# Altium schematic symbol library UCP.SchLib: 378 symbols (part 2 of 14)
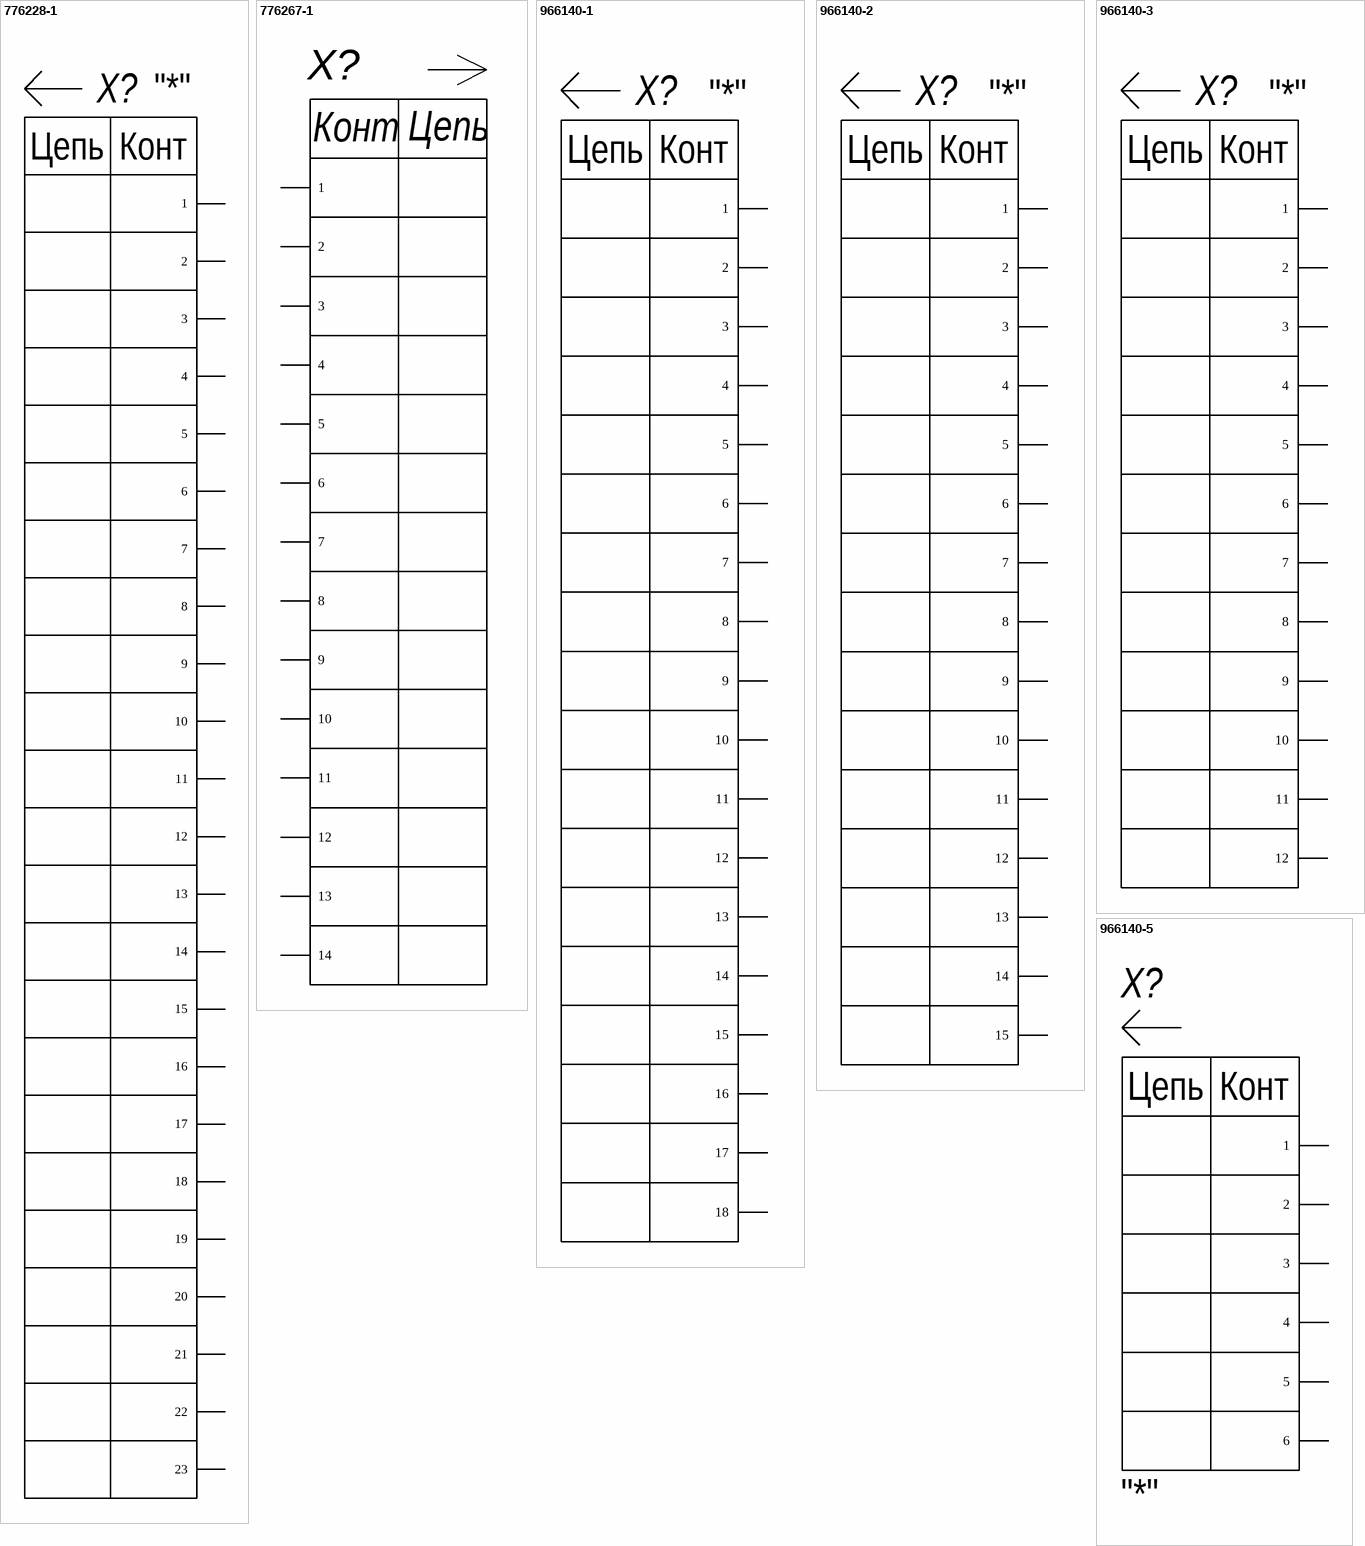
[diagram p25: symbols 776228-1 to 966140-5]

## 966140-3
designator X?  Marck-2: "*"  (hidden comment: 966140-3)
Connector Header Shrouded 12 Position 3.5mm Solder Right Angle Through Hole; Manufacturer 1: TE Connectivity; Manufacturer Part Number 1: 9-966140-3; Description 1: Conn Timer Connector HDR 12 POS 5mm Solder RA Thru-Hole 12 Terminal 1 Port Automotive Tray; Number of Terminals/Pins: 12; Circuit Application: Signal; Sealable: No (Without); Connector Type: Plug; Number of Ports: 1; PCB Mount Retention: Without; Shielding: Unshielded; Gender: Male; Primary Type: Rectangular; Tab Thickness: 0.8mm; Tab Width: 2.8mm; Row Spacing: 0.217inch; ComponentLink1URL: https://datasheet.ciiva.com/30081/eng-cat-1307998-1-0705-074-30081833.pdf?src-supplier=Onlinecomponents.com; ComponentLink1Description: https://datasheet.ciiva.com/30081/eng-cat-1307998-1-0705-074-30081833.pdf?src-supplier=Onlinecomponents.com; Marck-1: *; ComponentLink2URL: https://datasheet.ciiva.com/23803/1521067-23803407.pdf?src-supplier=Newark; ComponentLink2Description: https://datasheet.ciiva.com/23803/1521067-23803407.pdf?src-supplier=Newark; ComponentLink3URL: https://datasheet.ciiva.com/8003/1521067-8003965.pdf?src-supplier=Element14; ComponentLink3Description: https://datasheet.ciiva.com/8003/1521067-8003965.pdf?src-supplier=Element14; ComponentLink4URL: https://datasheet.ciiva.com/30152/291ddetrolleractionshowdocdocidcatalogsection7f1307998-2-gad-amp-30152293.pdf?src-supplier=Onlinecomponents.com; ComponentLink4Description: https://datasheet.ciiva.com/30152/291ddetrolleractionshowdocdocidcatalogsection7f1307998-2-gad-amp-30152293.pdf?src-supplier=Onlinecomponents.com; ComponentLink5URL: https://datasheet.ciiva.com/731/eng-cd-966140-f6-731254.pdf?src-supplier=Digi-Key; ComponentLink5Description: https://datasheet.ciiva.com/731/eng-cd-966140-f6-731254.pdf?src-supplier=Digi-Key; Supplier 1: Newark; Supplier Part Number 1: 16H9258; RoHS: Yes; Category: Headers and Wire Housings; Stock 1: 199; Pricing 1: 1=4,93000, 10=4,35000, 25=4,22000, 50=4,08000, 100=3,96000, 500=3,35000 (USD); Mount: THT; Contact Plating: Tin; Housing Material: Polyamide; Color: Black; Housing Color: Black; Contact Material: Bronze,Tin; Min Operating Temperature: -40°C; Max Operating Temperature: 212°C; Termination: Solder; Number of Contacts: 12; Number of Rows: 3; Packaging: Tray; Orientation: Right Angle; Package Quantity: 168; Number of Positions: 12; Series: Junior Power Timer; Number of Signal Positions: 12; PCB Mount Alignment: No (Without); Contact Type: Tab; Length: 1.4173inch; Width: 0.791inch; Pitch: 3.5mm; Radiation Hardening: No; ELV: Compliant; RoHS Compliant: Yes; Flammability Rating: UL94 HB; REACH SVHC: No SVHC; Lead Free: Lead Free; ComponentLink6URL: https://datasheet.ciiva.com/11759/0900766b80ee0736-11759911.pdf?src-supplier=RSComponents; ComponentLink6Description: https://datasheet.ciiva.com/11759/0900766b80ee0736-11759911.pdf?src-supplier=RSComponents; ComponentLink7URL: https://datasheet.ciiva.com/731/eng-cd-966140-f6-731255.pdf?src-supplier=Digi-Key; ComponentLink7Description: https://datasheet.ciiva.com/731/eng-cd-966140-f6-731255.pdf?src-supplier=Digi-Key; ComponentLink8URL: https://datasheet.ciiva.com/30179/291ddetrolleractionshowdocdocidcatalogsection7f1307998-2-gad-amp-30179467.pdf?src-supplier=Onlinecomponents.com; ComponentLink8Description: https://datasheet.ciiva.com/30179/291ddetrolleractionshowdocdocidcatalogsection7f1307998-2-gad-amp-30179467.pdf?src-supplier=Onlinecomponents.com; Supplier 2: RSComponents; Supplier Part Number 2: 7313117; Manufacturer 2: TE Connectivity; Manufacturer Part Number 2: 966140-3; Stock 2: 37; Pricing 2: 1=5,40600, 50=5,13500, 100=4,86500 (USD); ComponentLink9URL: https://datasheet.ciiva.com/11753/0900766b80f994f8-11753841.pdf?src-supplier=RSComponents; ComponentLink9Description: https://datasheet.ciiva.com/11753/0900766b80f994f8-11753841.pdf?src-supplier=RSComponents; ComponentLink10URL: https://datasheet.ciiva.com/30120/eng-cat-1307998-1-0705-074-30120973.pdf?src-supplier=Onlinecomponents.com; ComponentLink10Description: https://datasheet.ciiva.com/30120/eng-cat-1307998-1-0705-074-30120973.pdf?src-supplier=Onlinecomponents.com; Case/Package: DIP-12 (+MECH-2); Type: Вилка; Value: 966140-3
footprint TE_966140-3 (Conn Timer Connector HDR 12 POS 5mm Solder RA Thru-Hole 12 Terminal 1 Port Tray)
pins: 1, 2, 3, 4, 5, 6, 7, 8, 9, 10, 11, 12
text: Цепь; Конт

## 966140-5
designator X?  Marck-2: "*"  (hidden comment: 966140-5)
Conn Timer Connector HDR 6 POS 5mm Solder RA Thru-Hole 6 Terminal 1 Port Tray; Manufacturer 1: TE Connectivity AMP; Description 1: Conn Timer Connector HDR 6 POS 5mm Solder RA Thru-Hole 6 Terminal 1 Port Automotive Tray; Number of Terminals/Pins: 6; Number of Ports: 1; Circuit Application: Signal; PCB Mount Alignment: No (Without); PCB Mount Retention: Without; Shielding: Unshielded; Gender: Male; Primary Type: Rectangular; Pitch: 3.5mm; Tab Thickness: 0.8mm; Tab Width: 2.8mm; Value: 966140-4; ComponentLink1URL: https://datasheet.ciiva.com/30081/eng-cat-1307998-1-0705-074-30081833.pdf?src-supplier=Onlinecomponents.com; ComponentLink1Description: https://datasheet.ciiva.com/30081/eng-cat-1307998-1-0705-074-30081833.pdf?src-supplier=Onlinecomponents.com; Supplier 1: Newark; Supplier Part Number 1: 52R4345; Manufacturer Part Number 1: 966140-5; RoHS: Yes; Category: Connectors; Stock 1: 5; Pricing 1: 1=3,36000 (USD); Contact Material: Bronze; Contact Plating: Tin; Housing Material: Polyamide; Housing Color: Black; Color: Black; Min Operating Temperature: -40°C; Max Operating Temperature: 212°C; Number of Contacts: 6; Termination: Solder; Orientation: Right Angle; Number of Rows: 3; Package Quantity: 168; Packaging: Tray; Number of Positions: 6; Number of Signal Positions: 6; Sealable: No (Without); Series: Timer; Length: 1.0236inch; Width: 0.791inch; Lead Pitch: 5mm; Flammability Rating: UL94 HB; ELV: Compliant; RoHS Compliant: Yes; REACH SVHC: No SVHC; Lead Free: Lead Free; ComponentLink2URL: https://datasheet.ciiva.com/11759/0900766b80fa585c-11759987.pdf?src-supplier=RSComponents; ComponentLink2Description: https://datasheet.ciiva.com/11759/0900766b80fa585c-11759987.pdf?src-supplier=RSComponents; ComponentLink3URL: https://datasheet.ciiva.com/1439/1581332-1439076.pdf?src-supplier=Element14; ComponentLink3Description: https://datasheet.ciiva.com/1439/1581332-1439076.pdf?src-supplier=Element14; Marck-1: *; Case/Package: DIP-6 (+MECH-2); Mount: THT; Type: Вилка
footprint TE_966140-5 (Conn Timer Connector HDR 6 POS 5mm Solder RA Thru-Hole 6 Terminal 1 Port Tray)
pins: 1, 2, 3, 4, 5, 6
text: Цепь; Конт

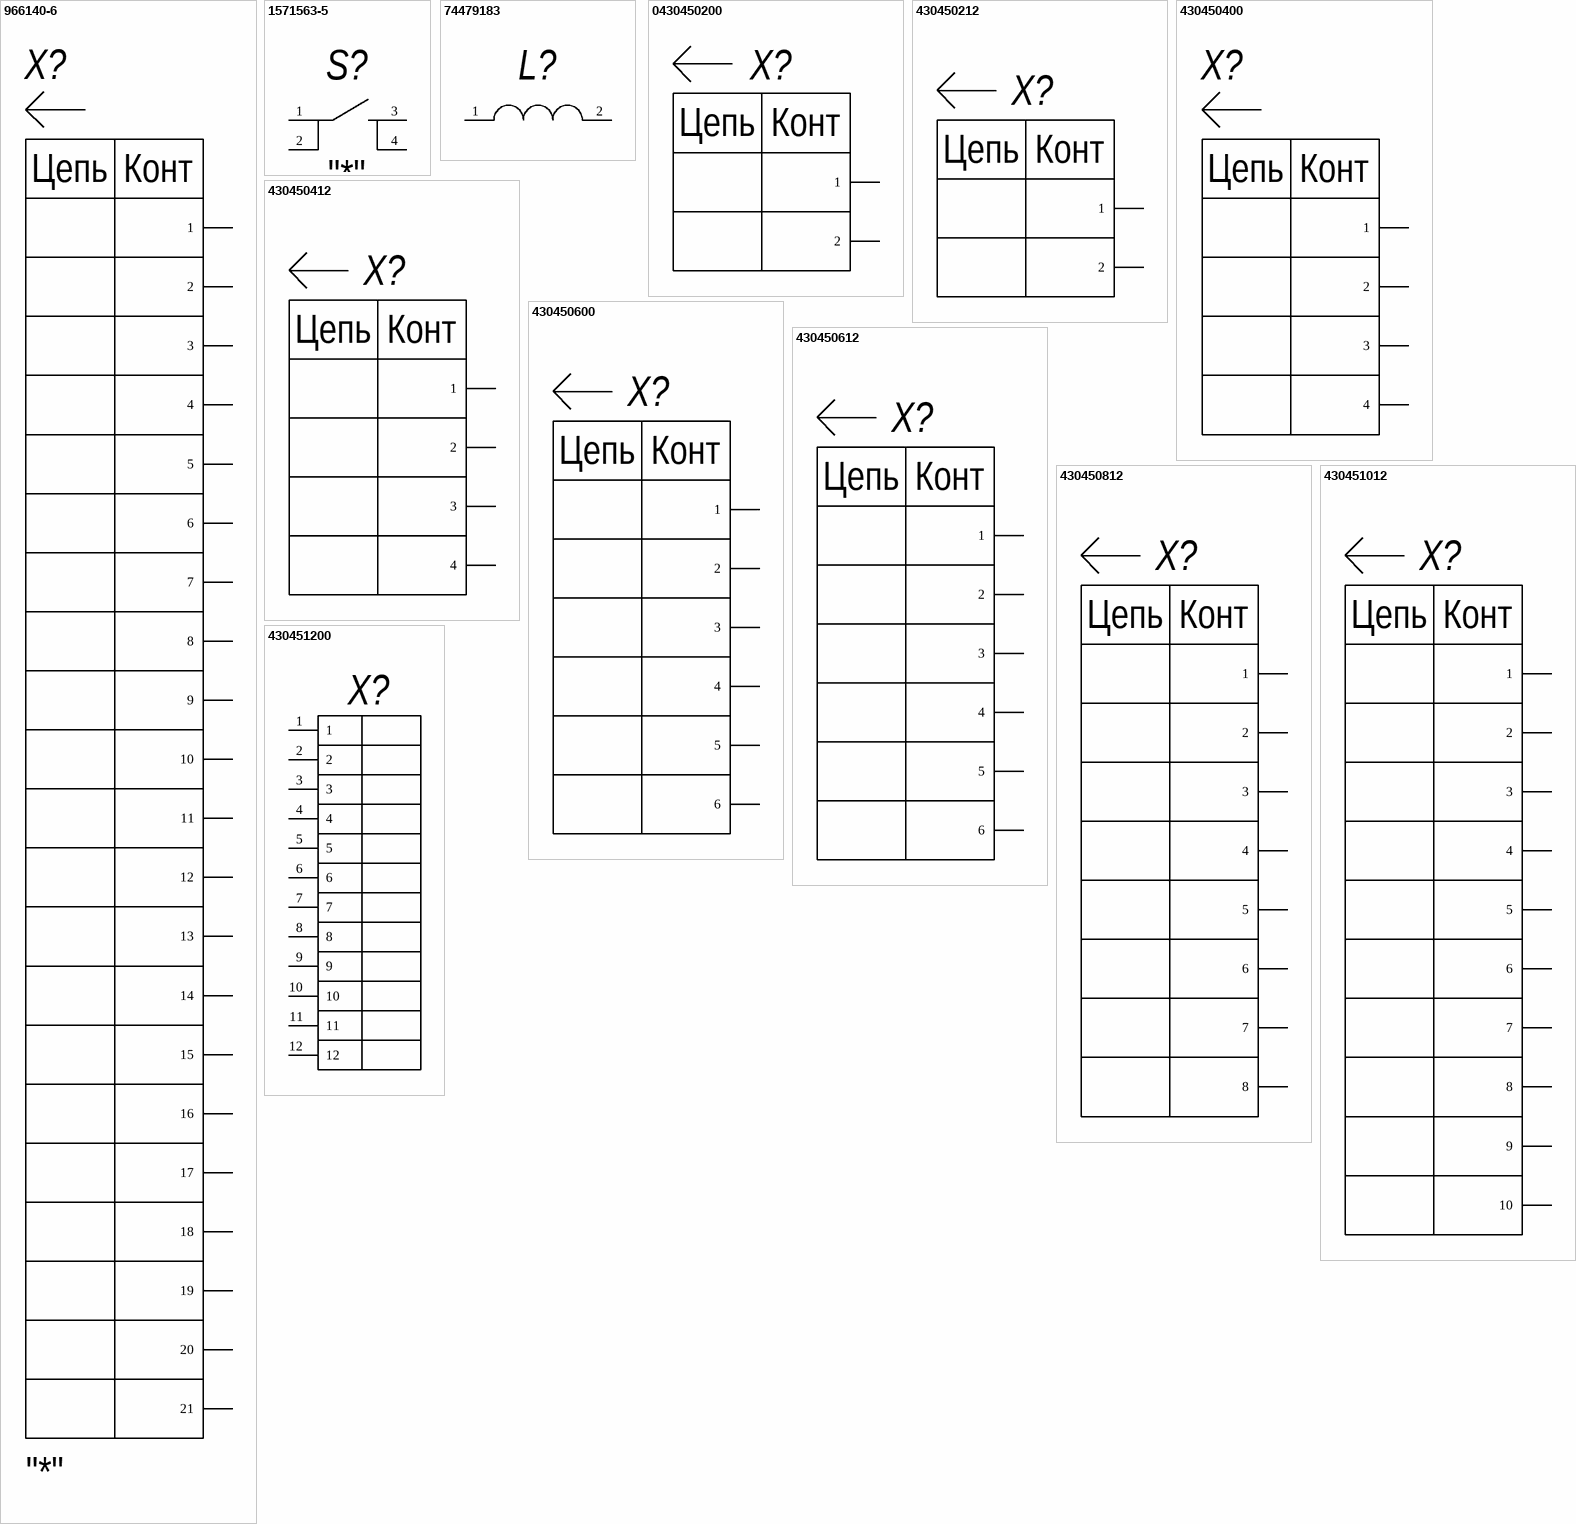
[diagram p3: symbols 966140-6 to 430451200]

## 966140-6
designator X?  Marck-2: "*"  (hidden comment: 966140-6)
Conn Timer Connector HDR 21 POS 5mm Solder RA Thru-Hole 21 Terminal 1 Port Tray; Manufacturer 1: TE Connectivity AMP; Manufacturer Part Number 1: 9-966140-6; Description 1: Conn Timer Connector HDR 21 POS 5mm Solder RA Thru-Hole 21 Terminal 1 Port Automotive Tray; Number of Terminals/Pins: 21; Circuit Application: Signal; Sealable: No (Without); PCB Mount Retention: Without; Shielding: Unshielded; Number of Ports: 1; Connector Type: Plug; Gender: Male; Pitch: 3.5mm; Tab Thickness: 0.8mm; Tab Width: 2.8mm; Value: 966140-5; Marck-1: *; Supplier 1: RSComponents; Supplier Part Number 1: 1839042; RoHS: Yes; Category: Headers and Wire Housings; Stock 1: 1; Pricing 1: 140=11,19100, 140=8,05600 (USD); Mount: THT; Contact Plating: Tin; Color: Black; Housing Color: Black; Housing Material: Polyamide; Contact Material: Bronze,Tin; Min Operating Temperature: -40°C; Max Operating Temperature: 212°C; Termination: Solder; Number of Rows: 3; Number of Contacts: 21; Package Quantity: 112; Number of Positions: 21; Packaging: Tray; Orientation: Right Angle; Number of Signal Positions: 21; PCB Mount Alignment: No (Without); Series: Messerleiste; Length: 51mm; Width: 0.791inch; Radiation Hardening: No; Flammability Rating: UL94 HB; ELV: Compliant; RoHS Compliant: Yes; REACH SVHC: No SVHC; Lead Free: Lead Free; ComponentLink1URL: https://datasheet.ciiva.com/23803/1605588-23803408.pdf?src-supplier=Newark; ComponentLink1Description: https://datasheet.ciiva.com/23803/1605588-23803408.pdf?src-supplier=Newark; ComponentLink2URL: https://datasheet.ciiva.com/30079/eng-cat-1307998-1-0705-074-30079007.pdf?src-supplier=Onlinecomponents.com; ComponentLink2Description: https://datasheet.ciiva.com/30079/eng-cat-1307998-1-0705-074-30079007.pdf?src-supplier=Onlinecomponents.com; ComponentLink3URL: https://datasheet.ciiva.com/29265/001005507-da-01-ml-21pol-messerleiste-90grad-de-en-29265446.pdf?src-supplier=Conrad; ComponentLink3Description: https://datasheet.ciiva.com/29265/001005507-da-01-ml-21pol-messerleiste-90grad-de-en-29265446.pdf?src-supplier=Conrad; Case/Package: DIP-21 (+MECH-2); Type: Вилка
footprint TE_966140-6 (Conn Timer Connector HDR 21 POS 5mm Solder RA Thru-Hole 21 Terminal 1 Port Tray)
pins: 1, 2, 3, 4, 5, 6, 7, 8, 9, 10, 11, 12, 13, 14, 15, 16, 17, 18, 19, 20, 21
text: Цепь; Конт

## 1571563-5
designator S?  Marck-2: "*"  (hidden comment: 1571563-5)
Alcoswitch Tactile FSM JSM, Tactile Switches, Round Actuator Style, Operating Function Yes, Copper Alloy, Silver, Low Profile 12.5 mm; Supplier 1: Newark; Supplier Part Number 1: 75AC5329; Marck-1: *; Case/Package: SMD-4; Mount: SMT; Type: Переключатель кнопочный; Value: 1571563-5
footprint 1571563-5 (Tactile Switches)
pins: 1 "Назначение вывода", 2 "Назначение вывода", 3 "Назначение вывода", 4 "Назначение вывода"

## 74479183
designator L?  (value not drawn)
WE-MI SMT Multilayer Inductor 22 uH 5 mA; Type: Бусина ферритовая; Value: FB1206; Case/Package: 1206; Mount: SMT
footprint INDC320X160X130L50
pins: 1 "Назначение вывода", 2 "Назначение вывода"

## 0430450200
designator X?  (value not drawn)
2 контакта; Supplier 1: Digi-Key; Supplier 2: Digi-Key; Supplier Part Number 1: WM1813-ND; Supplier Part Number 2: WM1813-ND; Case/Package: DIP-2 (+MECH-2); Mount: THT; Type: Вилка; Value: 430450200
footprint RHDRRA2W64P300_1X2_715X991H877 (Header, Right Angle Receptacle, 3.00 mm pitch; 0.64 mm lead width, 2 pins, 2 rows, 1 pins per row, 7.15mm L X 9.91 mm W X 8.77 mm H body)
pins: 1, 2
text: Цепь; Конт

## 430450212
designator X?  (value not drawn)
Conn.; Interconnect System; Header; Vertical; 2; Micro-Fit 3.0; Thru-Hole; Tin; Manufacturer 1: Molex; Manufacturer Part Number 1: 43045-0212; ComponentLink1URL: https://datasheet.ciiva.com/19462/883667-19462123.pdf?src-supplier=Jameco; ComponentLink1Description: https://datasheet.ciiva.com/19462/883667-19462123.pdf?src-supplier=Jameco; ComponentLink2URL: https://datasheet.ciiva.com/11748/0900766b800bd7d2-11748376.pdf?src-supplier=RSComponents; ComponentLink2Description: https://datasheet.ciiva.com/11748/0900766b800bd7d2-11748376.pdf?src-supplier=RSComponents; ComponentLink3URL: https://datasheet.ciiva.com/5159/0430451012-pcb-headers-142935-5159135.pdf?src-supplier=Mouser; ComponentLink3Description: https://datasheet.ciiva.com/5159/0430451012-pcb-headers-142935-5159135.pdf?src-supplier=Mouser; ComponentLink4URL: https://datasheet.ciiva.com/30056/13510430451012-pcb-headers-30056636.pdf?src-supplier=Onlinecomponents.com; ComponentLink4Description: https://datasheet.ciiva.com/30056/13510430451012-pcb-headers-30056636.pdf?src-supplier=Onlinecomponents.com; ComponentLink5URL: https://datasheet.ciiva.com/7810/19403-7810268.pdf?src-supplier=Element14; ComponentLink5Description: https://datasheet.ciiva.com/7810/19403-7810268.pdf?src-supplier=Element14; ComponentLink6URL: https://datasheet.ciiva.com/1443/1781464-1443548.pdf?src-supplier=Element14; ComponentLink6Description: https://datasheet.ciiva.com/1443/1781464-1443548.pdf?src-supplier=Element14; Supplier 1: RSComponents; Supplier Part Number 1: 2332860; RoHS: Yes; Category: Headers and Wire Housings; Stock 1: 120; Pricing 1: 5=1,00900, 100=0,75700, 375=0,71900, 1500=0,56400, 3000=0,49700 (USD); ComponentLink7URL: https://datasheet.ciiva.com/32372/143250430450212-pcb-headers-32372211.pdf?src-supplier=Onlinecomponents.com; ComponentLink7Description: https://datasheet.ciiva.com/32372/143250430450212-pcb-headers-32372211.pdf?src-supplier=Onlinecomponents.com; ComponentLink8URL: https://datasheet.ciiva.com/19462/1300161-19462301.pdf?src-supplier=Jameco; ComponentLink8Description: https://datasheet.ciiva.com/19462/1300161-19462301.pdf?src-supplier=Jameco; ComponentLink9URL: https://datasheet.ciiva.com/11746/0900766b800bd7d2-11746795.pdf?src-supplier=RSComponents; ComponentLink9Description: https://datasheet.ciiva.com/11746/0900766b800bd7d2-11746795.pdf?src-supplier=RSComponents; ComponentLink10URL: https://datasheet.ciiva.com/5151/0430450212-pcb-headers-142866-5151466.pdf?src-supplier=Mouser; ComponentLink10Description: https://datasheet.ciiva.com/5151/0430450212-pcb-headers-142866-5151466.pdf?src-supplier=Mouser; ComponentLink11URL: https://datasheet.ciiva.com/14155/04402316-14155231.pdf?src-supplier=Distrelec; ComponentLink11Description: https://datasheet.ciiva.com/14155/04402316-14155231.pdf?src-supplier=Distrelec; ComponentLink12URL: https://datasheet.ciiva.com/10089/0430450212-pcb-headers-10089435.pdf?src-supplier=Avnet; ComponentLink12Description: https://datasheet.ciiva.com/10089/0430450212-pcb-headers-10089435.pdf?src-supplier=Avnet; ComponentLink13URL: https://datasheet.ciiva.com/7920/19403-7920743.pdf?src-supplier=Element14; ComponentLink13Description: https://datasheet.ciiva.com/7920/19403-7920743.pdf?src-supplier=Element14; Case/Package: DIP-2 (+MECH-2); Mount: THT; Type: Вилка; Value: 430450212
footprint MOLEX_430450212
pins: 1, 2
text: Цепь; Конт

## 430450400
designator X?, comment 0430450400  (value not drawn)
Molex, Micro-Fit 3.0, 43045, 4 Way, 2 Row, Right Angle PCB Header; Contact Resistance: 10mR; Number of Positions: 4; Max Voltage Rating (AC): 250V; Connector Type: Male Pin; Pitch: 3mm; Row Spacing: 0.118inch; Supplier 1: Digi-Key; Supplier 2: Digi-Key; Supplier Part Number 1: WM1813-ND; Supplier Part Number 2: WM1813-ND; Supplier 3: RSComponents; Manufacturer 3: Molex; Manufacturer Part Number 3: 43045-0400; RoHS: Yes; Category: Headers and Wire Housings; Stock 3: 1610; Pricing 3: 5=1,47800, 125=1,15400, 500=0,95100, 2500=0,75800, 5000=0,71900, 5=1,07200, 125=0,83800, 500=0,69000, 2500=0,55000, 5000=0,52200 (USD); Mount: THT; Contact Plating: Tin; Contact Material: Brass; Color: Black; Housing Color: Black; Housing Material: Polymer; Min Operating Temperature: -40°C; Max Operating Temperature: 105°C; Number of Rows: 2; Packaging: Tray; Fastening Type: Ramp; Termination: Solder; Number of Contacts: 4; Orientation: Right Angle; Length: 10.15mm; Depth: 12.2mm; Flammability Rating: UL94 V-0; ComponentLink1URL: https://datasheet.ciiva.com/20209/22-3744e-20209522.pdf?src-supplier=Rapid+Electronics; ComponentLink1Description: https://datasheet.ciiva.com/20209/22-3744e-20209522.pdf?src-supplier=Rapid+Electronics; Supplier Part Number 3: 2332955; Case/Package: DIP-3 (+MECH-2); Type: Вилка; Value: 430450400
footprint RHDRRA4W64P300_2X2_1015X991H877 (Header, Right Angle Receptacle, 3.00 mm pitch; 0.64 mm lead width, 4 pins, 2 rows, 2 pins per row, 7.15mm L X 9.91 mm W X 8.77 mm H body)
pins: 1, 2, 3, 4
text: Цепь; Конт

## 430450412
designator X?  (value not drawn)
Header 2 Row Vertical Polarizing Peg 4 Pin Tin Plate SMT/Glow Wire Kinked Leads; Manufacturer 1: Molex; Manufacturer Part Number 1: 43045-0412; Value: 430450212; Marck-1: *; Marck-2: *; Supplier 1: RSComponents; Supplier Part Number 1: 2332876; RoHS: Yes; Category: Headers and Wire Housings; Stock 1: 60; Pricing 1: 5=1,28600, 100=0,96900, 375=0,92300, 1500=0,70300, 3000=0,63900 (USD); ComponentLink1URL: https://datasheet.ciiva.com/5158/0430450412-pcb-headers-142874-5158187.pdf?src-supplier=Mouser; ComponentLink1Description: https://datasheet.ciiva.com/5158/0430450412-pcb-headers-142874-5158187.pdf?src-supplier=Mouser; ComponentLink2URL: https://datasheet.ciiva.com/30095/176640430450412-pcb-headers-30095929.pdf?src-supplier=Onlinecomponents.com; ComponentLink2Description: https://datasheet.ciiva.com/30095/176640430450412-pcb-headers-30095929.pdf?src-supplier=Onlinecomponents.com; ComponentLink3URL: https://datasheet.ciiva.com/11747/0900766b800bd7d2-11747137.pdf?src-supplier=RSComponents; ComponentLink3Description: https://datasheet.ciiva.com/11747/0900766b800bd7d2-11747137.pdf?src-supplier=RSComponents; ComponentLink4URL: https://datasheet.ciiva.com/19462/883368-19462265.pdf?src-supplier=Jameco; ComponentLink4Description: https://datasheet.ciiva.com/19462/883368-19462265.pdf?src-supplier=Jameco; ComponentLink5URL: https://datasheet.ciiva.com/26916/getdatasheetpartid-253008-26916516.pdf?src-supplier=Verical; ComponentLink5Description: https://datasheet.ciiva.com/26916/getdatasheetpartid-253008-26916516.pdf?src-supplier=Verical; ComponentLink6URL: https://datasheet.ciiva.com/22637/1928349-22637530.pdf?src-supplier=Element14; ComponentLink6Description: https://datasheet.ciiva.com/22637/1928349-22637530.pdf?src-supplier=Element14; ComponentLink7URL: https://datasheet.ciiva.com/9468/0430450412-pcb-headers-9468485.pdf?src-supplier=Avnet; ComponentLink7Description: https://datasheet.ciiva.com/9468/0430450412-pcb-headers-9468485.pdf?src-supplier=Avnet; Case/Package: DIP-4 (+MECH-2); Mount: THT; Type: Вилка
footprint MOLEX_430450412
pins: 1, 2, 3, 4
text: Цепь; Конт

## 430450600
designator X?  (value not drawn)
Header, 2 Row, Right-angle, Polarizing Peg, 6 Pin, Tin Plate; Marck-1: *; Marck-2: *; ComponentLink1URL: https://datasheet.ciiva.com/19462/883464-19462371.pdf?src-supplier=Jameco; ComponentLink1Description: https://datasheet.ciiva.com/19462/883464-19462371.pdf?src-supplier=Jameco; ComponentLink2URL: https://datasheet.ciiva.com/30194/128550430450612-pcb-headers-30194512.pdf?src-supplier=Onlinecomponents.com; ComponentLink2Description: https://datasheet.ciiva.com/30194/128550430450612-pcb-headers-30194512.pdf?src-supplier=Onlinecomponents.com; ComponentLink3URL: https://datasheet.ciiva.com/5159/0430450612-pcb-headers-142990-5159553.pdf?src-supplier=Mouser; ComponentLink3Description: https://datasheet.ciiva.com/5159/0430450612-pcb-headers-142990-5159553.pdf?src-supplier=Mouser; ComponentLink4URL: https://datasheet.ciiva.com/11748/0900766b800bd7d2-11748707.pdf?src-supplier=RSComponents; ComponentLink4Description: https://datasheet.ciiva.com/11748/0900766b800bd7d2-11748707.pdf?src-supplier=RSComponents; ComponentLink5URL: https://datasheet.ciiva.com/9468/0430450612-pcb-headers-9468492.pdf?src-supplier=Avnet; ComponentLink5Description: https://datasheet.ciiva.com/9468/0430450612-pcb-headers-9468492.pdf?src-supplier=Avnet; Case/Package: DIP-6 (+MECH-1); Mount: THT; Type: Вилка; Value: 430450600
footprint RHDRRA6W64P300_3X2_1315X991H877 (Header, Right Angle Receptacle, 3.00 mm pitch; 0.64 mm lead width, 6 pins, 2 rows, 3 pins per row, 13.15 mm L X 9.91 mm W X 8.77 mm H body)
pins: 1, 2, 3, 4, 5, 6
text: Цепь; Конт

## 430450612
designator X?  (value not drawn)
Header, 2 Row, Vertical, Polarizing Peg, 6 Pin, Tin Plate, SMT/Glow Wire, Kinked Leads; Manufacturer 1: Molex; Manufacturer Part Number 1: 43045-0612; Marck-1: *; Marck-2: *; Supplier 1: RSComponents; Supplier Part Number 1: 2332898; RoHS: Yes; Category: Headers and Wire Housings; Stock 1: 2635; Pricing 1: 5=1,45200, 100=1,26400, 375=1,08700, 1500=0,90700, 3000=0,72700 (USD); ComponentLink1URL: https://datasheet.ciiva.com/19462/883464-19462371.pdf?src-supplier=Jameco; ComponentLink1Description: https://datasheet.ciiva.com/19462/883464-19462371.pdf?src-supplier=Jameco; ComponentLink2URL: https://datasheet.ciiva.com/30194/128550430450612-pcb-headers-30194512.pdf?src-supplier=Onlinecomponents.com; ComponentLink2Description: https://datasheet.ciiva.com/30194/128550430450612-pcb-headers-30194512.pdf?src-supplier=Onlinecomponents.com; ComponentLink3URL: https://datasheet.ciiva.com/5159/0430450612-pcb-headers-142990-5159553.pdf?src-supplier=Mouser; ComponentLink3Description: https://datasheet.ciiva.com/5159/0430450612-pcb-headers-142990-5159553.pdf?src-supplier=Mouser; ComponentLink4URL: https://datasheet.ciiva.com/11748/0900766b800bd7d2-11748707.pdf?src-supplier=RSComponents; ComponentLink4Description: https://datasheet.ciiva.com/11748/0900766b800bd7d2-11748707.pdf?src-supplier=RSComponents; ComponentLink5URL: https://datasheet.ciiva.com/9468/0430450612-pcb-headers-9468492.pdf?src-supplier=Avnet; ComponentLink5Description: https://datasheet.ciiva.com/9468/0430450612-pcb-headers-9468492.pdf?src-supplier=Avnet; Case/Package: DIP-6 (+MECH-2); Mount: THT; Type: Вилка; Value: 430450612
footprint MOLEX_430450612
pins: 1, 2, 3, 4, 5, 6
text: Цепь; Конт

## 430450812
designator X?  (value not drawn)
Header 2 Row Vertical Polarizing Peg 8 Pin Tin Plate SMT/Glow Wire Kinked Leads; Manufacturer 1: Molex; Manufacturer Part Number 1: 43045-0812; Marck-1: *; Marck-2: *; Supplier 1: RSComponents; Supplier Part Number 1: 2332905; RoHS: Yes; Category: Headers and Wire Housings; Stock 1: 1110; Pricing 1: 5=1,89300, 100=1,40900, 375=1,34000, 1500=1,03300 (USD); ComponentLink1URL: https://datasheet.ciiva.com/5158/0430450812-pcb-headers-168202-5158207.pdf?src-supplier=Mouser; ComponentLink1Description: https://datasheet.ciiva.com/5158/0430450812-pcb-headers-168202-5158207.pdf?src-supplier=Mouser; ComponentLink2URL: https://datasheet.ciiva.com/30103/175900430450812-pcb-headers-30103378.pdf?src-supplier=Onlinecomponents.com; ComponentLink2Description: https://datasheet.ciiva.com/30103/175900430450812-pcb-headers-30103378.pdf?src-supplier=Onlinecomponents.com; ComponentLink3URL: https://datasheet.ciiva.com/11748/0900766b800bd7d2-11748212.pdf?src-supplier=RSComponents; ComponentLink3Description: https://datasheet.ciiva.com/11748/0900766b800bd7d2-11748212.pdf?src-supplier=RSComponents; ComponentLink4URL: https://datasheet.ciiva.com/1489/430451213-sd-1489218.pdf?src-supplier=Newark; ComponentLink4Description: https://datasheet.ciiva.com/1489/430451213-sd-1489218.pdf?src-supplier=Newark; ComponentLink5URL: https://datasheet.ciiva.com/10087/0430450812-pcb-headers-10087849.pdf?src-supplier=Avnet; ComponentLink5Description: https://datasheet.ciiva.com/10087/0430450812-pcb-headers-10087849.pdf?src-supplier=Avnet; ComponentLink6URL: https://datasheet.ciiva.com/19462/883552-19462214.pdf?src-supplier=Jameco; ComponentLink6Description: https://datasheet.ciiva.com/19462/883552-19462214.pdf?src-supplier=Jameco; ComponentLink7URL: https://datasheet.ciiva.com/1443/1850008-1443539.pdf?src-supplier=Element14; ComponentLink7Description: https://datasheet.ciiva.com/1443/1850008-1443539.pdf?src-supplier=Element14; Case/Package: DIP-8 (+MECH-2); Mount: THT; Type: Вилка; Value: 430450812
footprint MOLEX_430450812
pins: 1, 2, 3, 4, 5, 6, 7, 8
text: Цепь; Конт

## 430451012
designator X?  (value not drawn)
Header 2 Row Vertical Polarizing Peg 10Pin Tin Plate SMT/Glow Wire Kinked Leads; Manufacturer 1: Molex; Manufacturer Part Number 1: 43045-1012; Marck-1: *; Marck-2: *; Supplier 1: RSComponents; Supplier Part Number 1: 2332911; RoHS: Yes; Category: Headers and Wire Housings; Stock 1: 10; Pricing 1: 5=2,46700, 100=1,81300, 375=1,72400, 1500=1,35000 (USD); ComponentLink1URL: https://datasheet.ciiva.com/19462/883667-19462123.pdf?src-supplier=Jameco; ComponentLink1Description: https://datasheet.ciiva.com/19462/883667-19462123.pdf?src-supplier=Jameco; ComponentLink2URL: https://datasheet.ciiva.com/11748/0900766b800bd7d2-11748376.pdf?src-supplier=RSComponents; ComponentLink2Description: https://datasheet.ciiva.com/11748/0900766b800bd7d2-11748376.pdf?src-supplier=RSComponents; ComponentLink3URL: https://datasheet.ciiva.com/5159/0430451012-pcb-headers-142935-5159135.pdf?src-supplier=Mouser; ComponentLink3Description: https://datasheet.ciiva.com/5159/0430451012-pcb-headers-142935-5159135.pdf?src-supplier=Mouser; ComponentLink4URL: https://datasheet.ciiva.com/30056/13510430451012-pcb-headers-30056636.pdf?src-supplier=Onlinecomponents.com; ComponentLink4Description: https://datasheet.ciiva.com/30056/13510430451012-pcb-headers-30056636.pdf?src-supplier=Onlinecomponents.com; ComponentLink5URL: https://datasheet.ciiva.com/7810/19403-7810268.pdf?src-supplier=Element14; ComponentLink5Description: https://datasheet.ciiva.com/7810/19403-7810268.pdf?src-supplier=Element14; ComponentLink6URL: https://datasheet.ciiva.com/1443/1781464-1443548.pdf?src-supplier=Element14; ComponentLink6Description: https://datasheet.ciiva.com/1443/1781464-1443548.pdf?src-supplier=Element14; Case/Package: DIP-10 (+MECH-2); Mount: THT; Type: Вилка; Value: 430451012
footprint MOLEX_430451012
pins: 1, 2, 3, 4, 5, 6, 7, 8, 9, 10
text: Цепь; Конт

## 430451200
designator X?  (value not drawn)
12 контактов; Supplier 1: Digi-Key; Supplier Part Number 1: WM1818-ND; Case/Package: DIP-12 (+MECH-2); Mount: THT; Type: Вилка; Value: 430451200
footprint RHDRRA12W64P300_6X2_1315X991H877 (Header, Right Angle Receptacle, 3.00 mm pitch; 0.64 mm lead width, 12 pins, 2 rows, 6 pins per row, 13.15 mm L X 9.91 mm W X 8.77 mm H body)
pins: 1 "Назначение вывода", 2 "Назначение вывода", 3 "Назначение вывода", 4 "Назначение вывода", 5 "Назначение вывода", 6 "Назначение вывода", 7 "Назначение вывода", 8 "Назначение вывода", 9 "Назначение вывода", 10 "Назначение вывода", 11 "Назначение вывода", 12 "Назначение вывода"

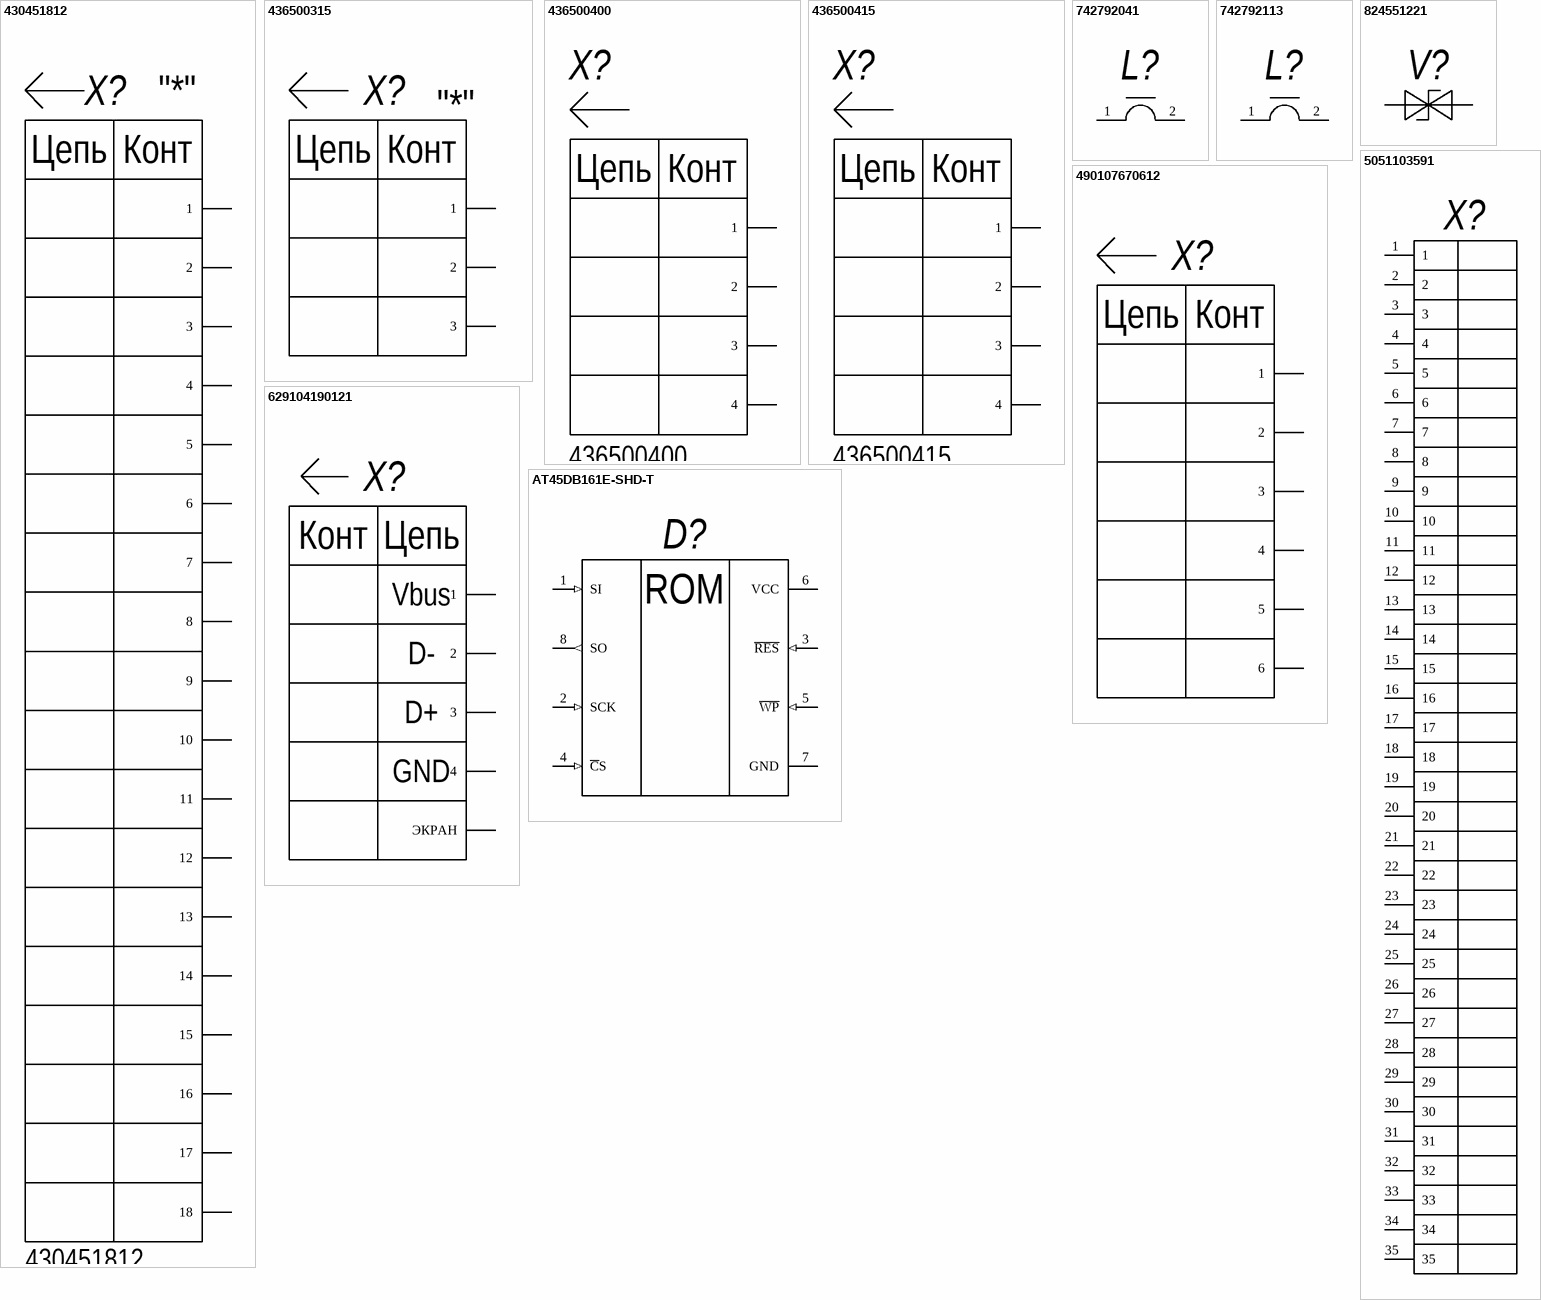
[diagram p4: symbols 430451812 to AT45DB161E-SHD-T]

## 430451812
designator X?  Marck-2: "*"  (hidden comment: 430451812)
Connector Wire to Board Header 18 Position 3mm Solder Straight Thru-Hole Tray; Manufacturer 1: Molex; Manufacturer Part Number 1: 43045-1812; Number of Contacts: 18; Current Rating: 5A; Voltage Rating: 250V; Contact Resistance: 10mR; Max Voltage Rating (DC): 250.25kV; Insulation Resistance: 1GR; Glow Wire Compliant: Compliant; ComponentLink1URL: https://datasheet.ciiva.com/30081/eng-cat-1307998-1-0705-074-30081833.pdf?src-supplier=Onlinecomponents.com; ComponentLink1Description: https://datasheet.ciiva.com/30081/eng-cat-1307998-1-0705-074-30081833.pdf?src-supplier=Onlinecomponents.com; Marck-1: *; Case/Package: DIP-18 (+MECH-2); Type: Вилка; Supplier 1: Rs; Supplier Part Number 1: 6700517; RoHS 1: Yes; Category: Headers and Wire Housings; Stock 1: 170; Pricing 1: 5=800,36800, 100=623,72000, 375=494,23300, 1500=413,95000, 3000=381,64700 (RUB); Mount: Through Hole; Contact Plating: Tin; Contact Material: Brass,Tin; Housing Color: Black; Material: Polyester; Housing Material: Thermoplastic; Min Operating Temperature: -40°C; Max Operating Temperature: 105°C; Number of Rows: 2; Termination: Through Hole; Package Quantity: 720; Packaging: Tray; Max Current Rating: 5A; Number of Positions: 18; Orientation: Vertical; Voltage Rating (DC): 250V; Number of Circuits: 18; Operating Supply Voltage: 250V; Series: 43045; Length: 31.15mm; Height: 9.91mm; Pitch: 3mm; Row Spacing: 3mm; Depth: 8.77mm; Halogen Free: Low Halogen; Flammability Rating: UL94 V-0; RoHS Compliant: Yes; ComponentLink2URL: https://datasheet.ciiva.com/19462/800041-19462030.pdf?src-supplier=Jameco; ComponentLink2Description: https://datasheet.ciiva.com/19462/800041-19462030.pdf?src-supplier=Jameco; ComponentLink3URL: https://datasheet.ciiva.com/5155/0430451812-pcb-headers-143079-5155894.pdf?src-supplier=Mouser; ComponentLink3Description: https://datasheet.ciiva.com/5155/0430451812-pcb-headers-143079-5155894.pdf?src-supplier=Mouser; ComponentLink4URL: https://datasheet.ciiva.com/30188/174960430451812-pcb-headers-30188024.pdf?src-supplier=Onlinecomponents.com; ComponentLink4Description: https://datasheet.ciiva.com/30188/174960430451812-pcb-headers-30188024.pdf?src-supplier=Onlinecomponents.com; ComponentLink5URL: https://datasheet.ciiva.com/1451/1626448-1451798.pdf?src-supplier=Farnell; ComponentLink5Description: https://datasheet.ciiva.com/1451/1626448-1451798.pdf?src-supplier=Farnell; ComponentLink6URL: https://datasheet.ciiva.com/11752/0900766b80d6135b-11752914.pdf?src-supplier=Rs; ComponentLink6Description: https://datasheet.ciiva.com/11752/0900766b80d6135b-11752914.pdf?src-supplier=Rs; ComponentLink7URL: https://datasheet.ciiva.com/14155/04402316-14155199.pdf?src-supplier=Distrelec; ComponentLink7Description: https://datasheet.ciiva.com/14155/04402316-14155199.pdf?src-supplier=Distrelec; ComponentLink8URL: https://datasheet.ciiva.com/1443/1864595-1443621.pdf?src-supplier=Element14; ComponentLink8Description: https://datasheet.ciiva.com/1443/1864595-1443621.pdf?src-supplier=Element14; Value: 430451812
footprint MOLEX_430451812
pins: 1, 2, 3, 4, 5, 6, 7, 8, 9, 10, 11, 12, 13, 14, 15, 16, 17, 18
text: Цепь; Конт

## 436500315
designator X?  Marck-2: "*"  (hidden comment: 436500315)
3 mm pin header single row 3 pin; Manufacturer 1: Molex; Manufacturer Part Number 1: 43650-0315; Value: 430450212; Marck-1: *; Supplier 1: Arrow Electronics; Supplier Part Number 1: 43650-0315; RoHS: Yes; Category: Headers and Wire Housings; Stock 1: 1426; Pricing 1: 1=1,31880, 10=1,11450, 80=0,94470, 2550=0,70390, 5100=0,67550, 10200=0,63870 (USD); ComponentLink1URL: https://datasheet.ciiva.com/19462/884168-19462356.pdf?src-supplier=Jameco; ComponentLink1Description: https://datasheet.ciiva.com/19462/884168-19462356.pdf?src-supplier=Jameco; ComponentLink2URL: https://datasheet.ciiva.com/5148/0436500315-pcb-headers-148698-5148209.pdf?src-supplier=Mouser; ComponentLink2Description: https://datasheet.ciiva.com/5148/0436500315-pcb-headers-148698-5148209.pdf?src-supplier=Mouser; ComponentLink3URL: https://datasheet.ciiva.com/30079/0436500315-pcb-headers-30079142.pdf?src-supplier=Onlinecomponents.com; ComponentLink3Description: https://datasheet.ciiva.com/30079/0436500315-pcb-headers-30079142.pdf?src-supplier=Onlinecomponents.com; ComponentLink4URL: https://datasheet.ciiva.com/11747/0900766b80307ce2-11747494.pdf?src-supplier=RSComponents; ComponentLink4Description: https://datasheet.ciiva.com/11747/0900766b80307ce2-11747494.pdf?src-supplier=RSComponents; ComponentLink5URL: https://datasheet.ciiva.com/9449/0436500315-pcb-headers-9449443.pdf?src-supplier=Avnet; ComponentLink5Description: https://datasheet.ciiva.com/9449/0436500315-pcb-headers-9449443.pdf?src-supplier=Avnet; ComponentLink6URL: https://datasheet.ciiva.com/14155/04402069-14155221.pdf?src-supplier=Distrelec; ComponentLink6Description: https://datasheet.ciiva.com/14155/04402069-14155221.pdf?src-supplier=Distrelec; ComponentLink7URL: https://datasheet.ciiva.com/1443/1722362-1443708.pdf?src-supplier=Element14; ComponentLink7Description: https://datasheet.ciiva.com/1443/1722362-1443708.pdf?src-supplier=Element14; Case/Package: DIP-3 (+MECH-2); Mount: THT; Type: Вилка
footprint MOLEX_436500315
pins: 1, 2, 3
text: Цепь; Конт

## 436500400
designator X?
Header 1 Row Right-angle 4 Pin; Marck-1: *; Marck-2: *; RoHS: Yes; Category: Headers and Wire Housings; ComponentLink1URL: https://datasheet.ciiva.com/5158/0430450412-pcb-headers-142874-5158187.pdf?src-supplier=Mouser; ComponentLink1Description: https://datasheet.ciiva.com/5158/0430450412-pcb-headers-142874-5158187.pdf?src-supplier=Mouser; ComponentLink2URL: https://datasheet.ciiva.com/30095/176640430450412-pcb-headers-30095929.pdf?src-supplier=Onlinecomponents.com; ComponentLink2Description: https://datasheet.ciiva.com/30095/176640430450412-pcb-headers-30095929.pdf?src-supplier=Onlinecomponents.com; ComponentLink3URL: https://datasheet.ciiva.com/11747/0900766b800bd7d2-11747137.pdf?src-supplier=RSComponents; ComponentLink3Description: https://datasheet.ciiva.com/11747/0900766b800bd7d2-11747137.pdf?src-supplier=RSComponents; ComponentLink4URL: https://datasheet.ciiva.com/19462/883368-19462265.pdf?src-supplier=Jameco; ComponentLink4Description: https://datasheet.ciiva.com/19462/883368-19462265.pdf?src-supplier=Jameco; ComponentLink5URL: https://datasheet.ciiva.com/26916/getdatasheetpartid-253008-26916516.pdf?src-supplier=Verical; ComponentLink5Description: https://datasheet.ciiva.com/26916/getdatasheetpartid-253008-26916516.pdf?src-supplier=Verical; ComponentLink6URL: https://datasheet.ciiva.com/22637/1928349-22637530.pdf?src-supplier=Element14; ComponentLink6Description: https://datasheet.ciiva.com/22637/1928349-22637530.pdf?src-supplier=Element14; ComponentLink7URL: https://datasheet.ciiva.com/9468/0430450412-pcb-headers-9468485.pdf?src-supplier=Avnet; ComponentLink7Description: https://datasheet.ciiva.com/9468/0430450412-pcb-headers-9468485.pdf?src-supplier=Avnet; Case/Package: DIP-4 (+MECH-2); Mount: THT; Type: Вилка; Supplier 1: Avnet; Supplier Part Number 1: 01E9837; Value: 436500400
footprint MOLEX_436500400
pins: 1, 2, 3, 4
text: Цепь; Конт

## 436500415
designator X?
Header 1 Row 4 Pin; Marck-1: *; Marck-2: *; RoHS: Yes; Category: Headers and Wire Housings; ComponentLink1URL: https://datasheet.ciiva.com/5158/0430450412-pcb-headers-142874-5158187.pdf?src-supplier=Mouser; ComponentLink1Description: https://datasheet.ciiva.com/5158/0430450412-pcb-headers-142874-5158187.pdf?src-supplier=Mouser; ComponentLink2URL: https://datasheet.ciiva.com/30095/176640430450412-pcb-headers-30095929.pdf?src-supplier=Onlinecomponents.com; ComponentLink2Description: https://datasheet.ciiva.com/30095/176640430450412-pcb-headers-30095929.pdf?src-supplier=Onlinecomponents.com; ComponentLink3URL: https://datasheet.ciiva.com/11747/0900766b800bd7d2-11747137.pdf?src-supplier=RSComponents; ComponentLink3Description: https://datasheet.ciiva.com/11747/0900766b800bd7d2-11747137.pdf?src-supplier=RSComponents; ComponentLink4URL: https://datasheet.ciiva.com/19462/883368-19462265.pdf?src-supplier=Jameco; ComponentLink4Description: https://datasheet.ciiva.com/19462/883368-19462265.pdf?src-supplier=Jameco; ComponentLink5URL: https://datasheet.ciiva.com/26916/getdatasheetpartid-253008-26916516.pdf?src-supplier=Verical; ComponentLink5Description: https://datasheet.ciiva.com/26916/getdatasheetpartid-253008-26916516.pdf?src-supplier=Verical; ComponentLink6URL: https://datasheet.ciiva.com/22637/1928349-22637530.pdf?src-supplier=Element14; ComponentLink6Description: https://datasheet.ciiva.com/22637/1928349-22637530.pdf?src-supplier=Element14; ComponentLink7URL: https://datasheet.ciiva.com/9468/0430450412-pcb-headers-9468485.pdf?src-supplier=Avnet; ComponentLink7Description: https://datasheet.ciiva.com/9468/0430450412-pcb-headers-9468485.pdf?src-supplier=Avnet; Case/Package: DIP-4 (+MECH-2); Mount: THT; Type: Вилка; Supplier 1: Rs; Supplier Part Number 1: 4476906P; Value: 436500415
footprint MOLEX_436500415
pins: 1, 2, 3, 4
text: Цепь; Конт

## 742792041
designator L?  (value not drawn)
WE-CBF SMT EMI Suppression Ferrite Bead, size 0805, 600Ohm, 1.5A; Manufacturer: Wurth Elektronik; Impedance max.: 700Ohm; DC Resistance max.: 0.4Ohm; Type: Бусина ферритовая; ComponentLink1Description: Manufacturer; ComponentLink1URL: http://www.we-online.de; ComponentLink2Description: Datasheet; ComponentLink2URL: https://www.we-online.com/catalog/datasheet/742792041.pdf; Operating Temperature: -55 to +125degC; Packaging: Tape and Reel; Published Date: March 2020; Rated Current: 1.5A; Manufacturer Part Number: 742792041; Impedance @100MHz: 600Ohm; Mounting Technology: SMT; Size: 0805; Supplier 1: Digi-Key; Supplier 2: Digi-Key; Supplier 3: Digi-Key; Supplier Part Number 1: 732-1604-1-ND; Supplier Part Number 2: 732-1605-1-ND; Supplier Part Number 3: 732-1589-1-ND; Case/Package: 0805; Mount: SMT; Value: 742792041
footprint WE-CBF_0805_Wide Band (SMD EMI Suppression Ferrite  Bead, body 2x1.2mm)
footprint INDC200X125X60L35 (Inductor, Chip; 2.00 mm L X 1.25 mm W X 0.60 mm H body)
pins: 1 "Назначение вывода", 2 "Назначение вывода"

## 742792113
designator L?  (value not drawn)
WE-CBF SMT EMI Suppression / Ferrite Bead; Type: Бусина ферритовая; Value: FB1206; Supplier 1: Digi-Key; Supplier Part Number 1: 732-1622-1-ND; Case/Package: 1206; Mount: SMT
footprint 742792113 (Ferrit bead, Chip; 3.2 mm L X 1.60 mm W X 1.1 mm H body)
footprint INDC320X160X130L50
pins: 1 "Назначение вывода", 2 "Назначение вывода"

## 824551221
designator V?  (value not drawn)
WE-TVSP Power TVS Diode; Supplier 1: Digi-Key; Supplier Part Number 1: 732-9885-2-ND; Case/Package: SMC (DO-214AB); Mount: SMT; Type: Диод; Value: 824551221
footprint WE-TVSP_DO-214AB_Bidirectional (Power TVS Diode, 2-Leads. body 6.86x5.9mm)
pins: 1 A, 2 A

## 5051103591
designator X?  (value not drawn)
35 контактов; Supplier 1: Newark; Supplier Part Number 1: 78AC0553; Case/Package: SMD-37; Mount: SMT; Type: Розетка; Value: 5051103591
footprint 5051103591 (Connector)
footprint 5051103591_v2 (Connector)
pins: 1 "Назначение вывода", 2 "Назначение вывода", 3 "Назначение вывода", 4 "Назначение вывода", 5 "Назначение вывода", 6 "Назначение вывода", 7 "Назначение вывода", 8 "Назначение вывода", 9 "Назначение вывода", 10 "Назначение вывода", 11 "Назначение вывода", 12 "Назначение вывода", 13 "Назначение вывода", 14 "Назначение вывода", 15 "Назначение вывода", 16 "Назначение вывода", 17 "Назначение вывода", 18 "Назначение вывода", 19 "Назначение вывода", 20 "Назначение вывода", 21 "Назначение вывода", 22 "Назначение вывода", 23 "Назначение вывода", 24 "Назначение вывода", 25 "Назначение вывода", 26 "Назначение вывода", 27 "Назначение вывода", 28 "Назначение вывода", 29 "Назначение вывода", 30 "Назначение вывода", 31 "Назначение вывода", 32 "Назначение вывода", 33 "Назначение вывода", 34 "Назначение вывода", 35 "Назначение вывода"

## 490107670612
designator X?  (value not drawn)  (no BOM)
WR-WST REDFIT IDC SKEDD, pitch 2.54mm, 6pins; Case/Package: DIP-6 (+MECH-2); Mount: THT; Type: Вилка; Value: 490107670612
footprint 490107670612_Debugging Application (REDFIT IDC SKEDD Connector, pitch 2.54mm, 6p)
footprint 490107670612_Permanent Application (REDFIT IDC SKEDD Connector, pitch 2.54mm, 6p)
footprint 490107670612_Debugging Application No TopOverlay (REDFIT IDC SKEDD Connector, pitch 2.54mm, 6p)
pins: 1, 2, 3, 4, 5, 6
text: Цепь; Конт

## 629104190121
designator X?  (value not drawn)
USB 2.0 Type A, Receptacle, Horizontal - Short Type, SMT; Manufacturer: Wurth Elektronik; Rated Current: 1.5A; Pin Number: 4; Interface Type: Type A; Working Voltage: 30VAC; ComponentLink1Description: Manufacturer; ComponentLink1URL: http://www.we-online.de; ComponentLink2Description: Datasheet; ComponentLink2URL: https://katalog.we-online.com/em/datasheet/629104190121.pdf; Published Date: August 2020; Manufacturer Part Number: 629104190121; Gender: Receptacle; Type: Розетка; Packaging: Tape and Reel; Operating Temperature: -40 to +85degC; Mounting Technology: SMT; Application: USB 2.0; Supplier 1: Digi-Key; Supplier Part Number 1: 732-11179-1-ND; Case/Package: SMD-8; Mount: SMT; Value: 629104190121
footprint 629104190121 (USB 2.0 Type A Horizontal SMT Short Type)
pins: 1, 2, 3, 4, Shell ЭКРАН
text: Конт; Цепь; Vbus; D-; D+; GND

## AT45DB161E-SHD-T
designator D?  (value not drawn)
FLASH Memory IC 16 Mbit (528 Byte x 4096 sidor) SPI 85 Mhz 8-SOIC 208-mil; Manufacturer 1: Adesto Technologies; Description 1: FLASH Memory IC 16 Mb (528 Byte x 4 096 sidor) SPI 85MHz 8-SOIC; Density: 16Mb; Interface: SPI,Serial; Address Bus Width: 21b; Operating Supply Voltage: 3.3V; Access Time: 6ns; Min Supply Voltage: 2.5V; Max Supply Voltage: 3.6V; Nominal Supply Current: 26mA; Sync/Async: Synchronous; Page Size: 512B; Memory Type: NOR,FLASH,DataFLASH; Memory Size: 528B; Data Bus Width: 8b; Frequency: 85MHz; Max Frequency: 70MHz; Type: Микросхема; Supplier 1: Newark; Supplier Part Number 1: 78AC6085; Manufacturer Part Number 1: AT45DB161E-SHD-T; RoHS: Yes; Category: Memory; Pricing 1: 1=2,22000, 10=2,00000, 25=1,97000, 50=1,96000, 100=1,76000, 250=1,70000 (USD); Mount: SMT; Case/Package: SOIC-8-208; Number of Pins: 8; Min Operating Temperature: -40°C; Max Operating Temperature: 85°C; Packaging: Tape and Reel; Access Time-Max: 6ns; Supply Current: 26mA; Package Quantity: 1; Series: -; Programming Voltage: 3.6V; Radiation Hardening: No; RoHS Compliant: Yes; Lead Free: Lead Free; Value: AT45DB161E
footprint SOIC8P127_528X790X100L65X41N (Small Outline IC, 1.27 mm pitch; 8 pin, 5.33 mm L X 5.33 mm W X 2.16 mm H body)
pins: 1 SI (in) "Serial Input", 2 SCK (in) "Serial Clock", 3 ~{RES} (in) "Reset (Activ Low)", 4 ~{C}S (in) "Chip Select (Activ Low)", 5 ~{WP} (in) "Write Protect (Active Low)", 6 VCC (power) "Device Power Supply", 7 GND (power) "Ground", 8 SO (out) "Serial Output"
text: ROM

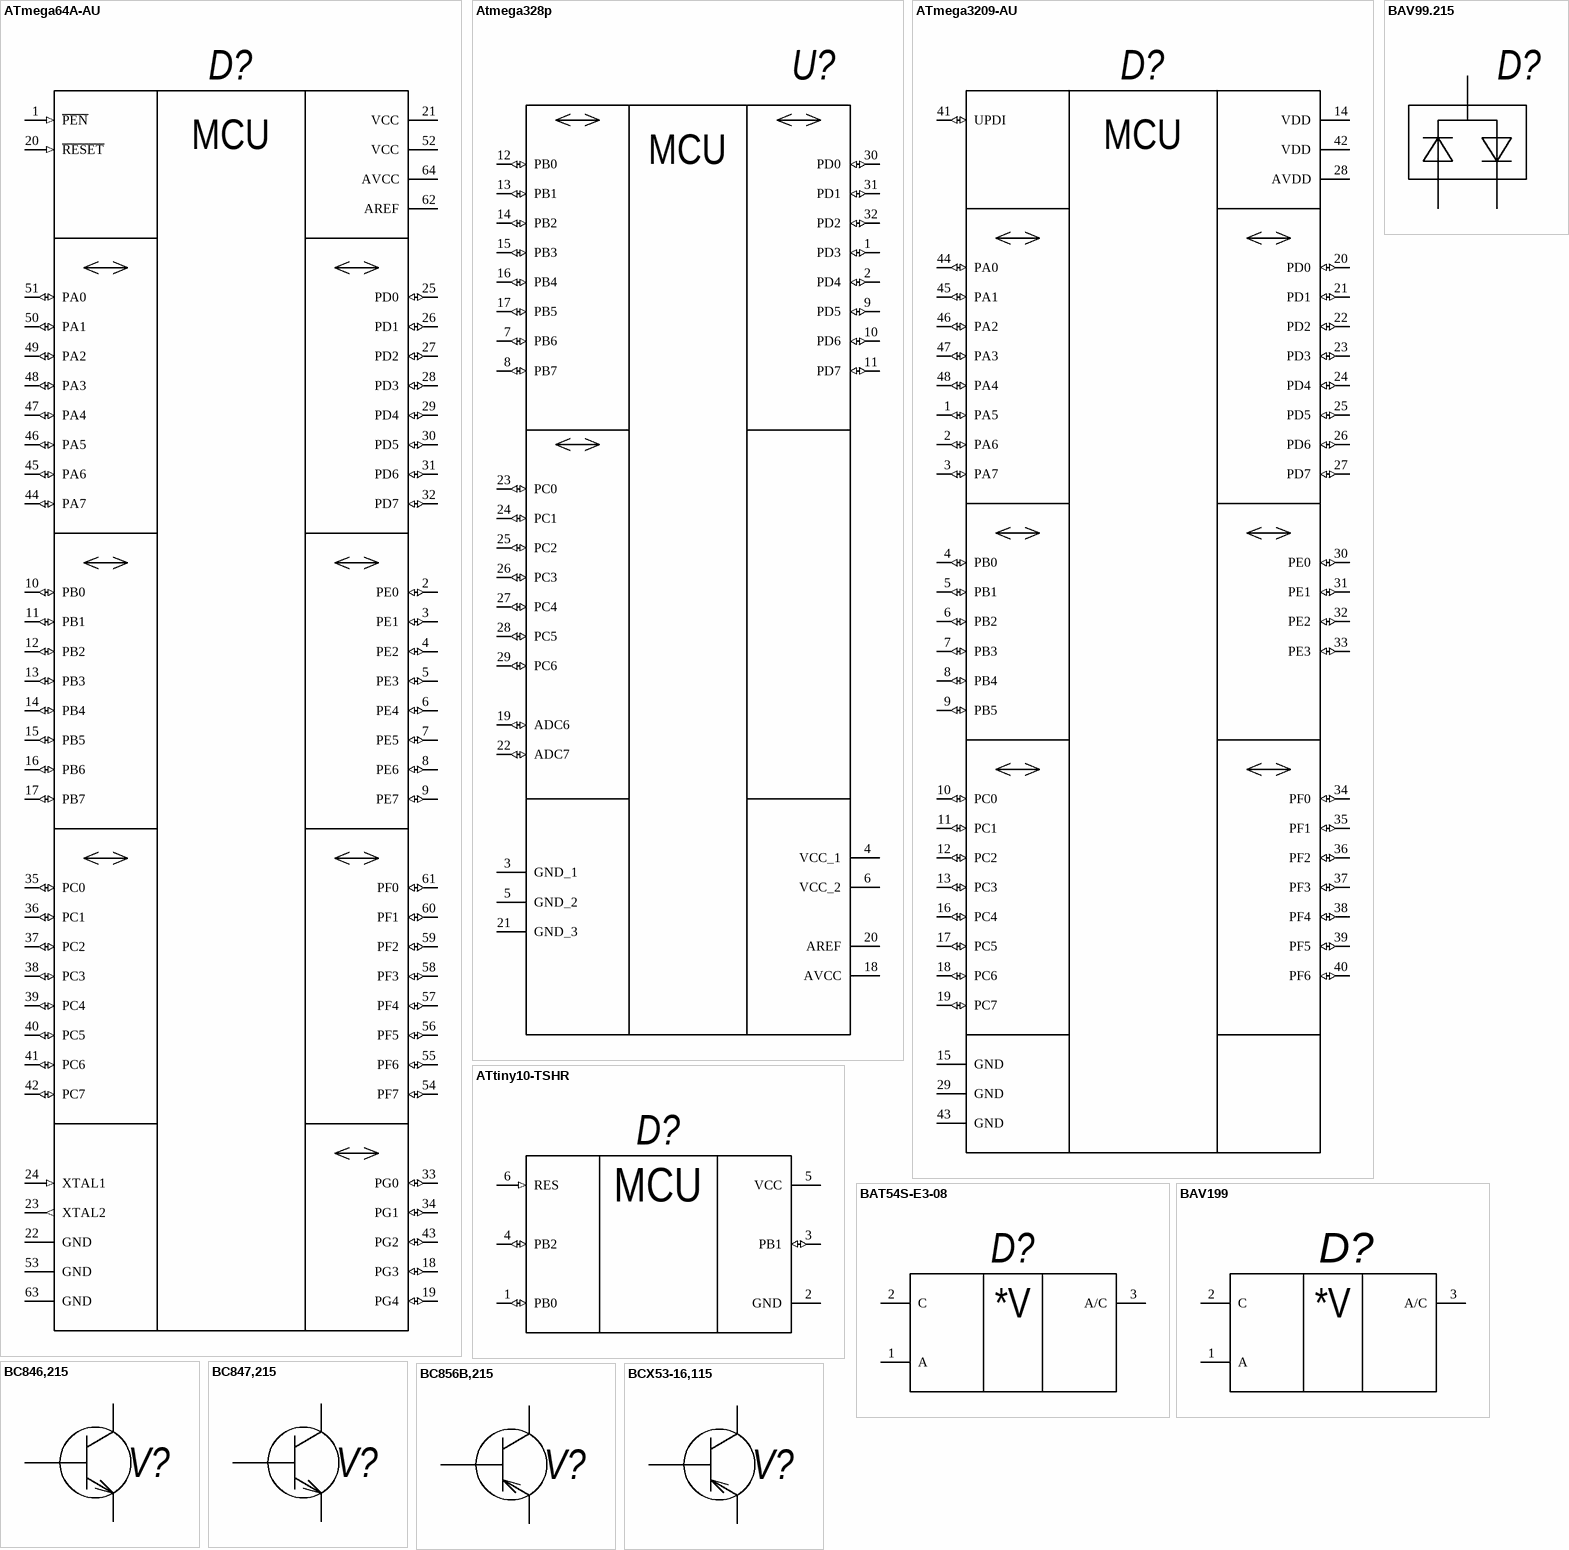
[diagram p5: symbols ATmega64A-AU to BCX53-16,115]

## ATmega64A-AU
designator D?  (value not drawn)
8-bit AVR Microcontroller, 2.7-5.5V, 16MHz, 64KB Flash, 2KB EEPROM, 4KB SRAM, 64-pin TQFP, Industrial Grade (-40°C to 85°C); Type: Микросхема; Value: AT64; ComponentLink1URL: http://www.microchip.com; ComponentLink3Description: ATmega64A Summary; RevisionNote: DatasheetVersion updated. URLs added.; ComponentLink3URL: http://ww1.microchip.com/downloads/en/DeviceDoc/Atmel-8160-8-bit-AVR-Microcontroller-ATmega64A-datasheet.pdf; ComponentLink1Description: Manufacturer URL; ComponentLink2URL: http://ww1.microchip.com/downloads/en/DeviceDoc/Atmel-8160-8-bit-AVR-Microcontroller-ATmega64A-datasheet.pdf; PackageVersion: revC, Oct-2010; DatasheetVersion: revE, Jul-2015; Code_JEDEC: MS-026-AEB; PackageDescription: 64-Pin Plastic Thin Profile Quad Flat Pack, 14 x 14 x 1.0 mm Body, 0.8 mm Pitch (TQFP); ComponentLink2Description: ATmega64A Datasheet; PackageReference: 64A; Supplier 1: Digi-Key; Supplier Part Number 1: ATMEGA64A-AU-ND; Case/Package: TQFP-64; Mount: SMT
footprint QFP64P80_1600X1600X120L60X37N (Quad Flat Pack (QFP), 0.80 mm pitch; square, 16 pin X 16 pin, 14.00 mm L X 14.00 mm W X 1.20 mm H body)
pins: 1 ~{PEN} (in), 2 PE0 (io), 3 PE1 (io), 4 PE2 (io), 5 PE3 (io), 6 PE4 (io), 7 PE5 (io), 8 PE6 (io), 9 PE7 (io), 10 PB0 (io), 11 PB1 (io), 12 PB2 (io), 13 PB3 (io), 14 PB4 (io), 15 PB5 (io), 16 PB6 (io), 17 PB7 (io), 18 PG3 (io), 19 PG4 (io), 20 ~{RESET} (in), 21 VCC (power), 22 GND (power), 23 XTAL2 (out), 24 XTAL1 (in), 25 PD0 (io), 26 PD1 (io), 27 PD2 (io), 28 PD3 (io), 29 PD4 (io), 30 PD5 (io), 31 PD6 (io), 32 PD7 (io), 33 PG0 (io), 34 PG1 (io), 35 PC0 (io), 36 PC1 (io), 37 PC2 (io), 38 PC3 (io), 39 PC4 (io), 40 PC5 (io), 41 PC6 (io), 42 PC7 (io), 43 PG2 (io), 44 PA7 (io), 45 PA6 (io), 46 PA5 (io), 47 PA4 (io), 48 PA3 (io), 49 PA2 (io), 50 PA1 (io), 51 PA0 (io), 52 VCC (power), 53 GND (power), 54 PF7 (io), 55 PF6 (io), 56 PF5 (io), 57 PF4 (io), 58 PF3 (io), 59 PF2 (io), 60 PF1 (io), 61 PF0 (io), 62 AREF (power), 63 GND (power), 64 AVCC (power)
text: MCU

## Atmega328p
designator U?  (value not drawn)
8-bit AVR® RISC-based microcontroller combines 32 KB ISP Flash memory with read-while-write capabilities, 1024B EEPROM, 2 KB SRAM, 23 general purpose I/O lines, 32 general purpose working registers; Value: AT328; Supplier 1: Arrow Electronics; Supplier Part Number 1: ATMEGA328P-AU; Case/Package: TQFP-32; Mount: SMT; Type: Микросхема
footprint QFP32P80_900X900X120L60X37 (Quad Flat Pack (QFP), 0.80 mm pitch;  square, 8 pin X 8 pin, 7.00 mm L X 7.00 mm W X 1.20 mm H body)
pins: 1 PD3 (io), 2 PD4 (io), 3 GND_1 (power) "VSS_2", 4 VCC_1 (power) "VSS_1", 5 GND_2 (power) "VSS_4", 6 VCC_2 (power) "VSS_2", 7 PB6 (io), 8 PB7 (io), 9 PD5 (io), 10 PD6 (io), 11 PD7 (io), 12 PB0 (io), 13 PB1 (io), 14 PB2 (io), 15 PB3 (io) "PB3/TRACESWO", 16 PB4 (io), 17 PB5 (io), 18 AVCC (power) "VDD_5", 19 ADC6 (io) "PC7", 20 AREF (power) "VDD_4", 21 GND_3 (power) "VSS_5", 22 ADC7 (io) "PC7", 23 PC0 (io), 24 PC1 (io), 25 PC2 (io), 26 PC3 (io), 27 PC4 (io), 28 PC5 (io), 29 PC6 (io), 30 PD0 (io), 31 PD1 (io), 32 PD2 (io)
text: MCU

## ATmega3209-AU
designator D?  (value not drawn)
8-bit AVR Microcontroller, 2.7-5.5V, 20MHz, 32KB Flash, 256B EEPROM, 4KB SRAM, 48-pin TQFP, Industrial Grade (-40°C to 85°C); Type: Микросхема; Value: AT3209; Supplier 1: Digi-Key; Supplier 2: Digi-Key; Supplier Part Number 2: 150-ATMEGA3209-AURCT-ND; Supplier Part Number 1: 150-ATMEGA3209-AU-ND; Case/Package: TQFP-48; Mount: SMT
footprint QFP48P50_900X900X120L60X22N (Quad Flat Pack (QFP), 0.50 mm pitch; square, 12 pin X 12 pin, 7.00 mm L X 7.00 mm W X 1.20 mm H body)
footprint QFP48P50_900X900X120L60X22N_V2 (Quad Flat Pack (QFP), 0.50 mm pitch; square, 12 pin X 12 pin, 7.00 mm L X 7.00 mm W X 1.20 mm H body)
pins: 1 PA5 (io), 2 PA6 (io), 3 PA7 (io), 4 PB0 (io), 5 PB1 (io), 6 PB2 (io), 7 PB3 (io), 8 PB4 (io), 9 PB5 (io), 10 PC0 (io), 11 PC1 (io), 12 PC2 (io), 13 PC3 (io), 14 VDD (power), 15 GND (power), 16 PC4 (io), 17 PC5 (io), 18 PC6 (io), 19 PC7 (io), 20 PD0 (io), 21 PD1 (io), 22 PD2 (io), 23 PD3 (io), 24 PD4 (io), 25 PD5 (io), 26 PD6 (io), 27 PD7 (io), 28 AVDD (power), 29 GND (power), 30 PE0 (io), 31 PE1 (io), 32 PE2 (io), 33 PE3 (io), 34 PF0 (io), 35 PF1 (io), 36 PF2 (io), 37 PF3 (io), 38 PF4 (io), 39 PF5 (io), 40 PF6 (io), 41 UPDI (io), 42 VDD (power), 43 GND (power), 44 PA0 (io), 45 PA1 (io), 46 PA2 (io), 47 PA3 (io), 48 PA4 (io)
text: MCU

## ATtiny10-TSHR
designator D?  (value not drawn)
The ATtiny10 is a low power, CMOS 8-bit microcontrollers based on the AVR® enhanced RISC architecture. The ATtiny4/5/9/10 is a 6/8-pins device ranging from 512 Bytes to 1024 Bytes Flash, with 32 Bytes SRAM; Type: Микросхема; Supplier 1: Newark; Supplier 2: Newark; Supplier 3: Digi-Key; Supplier 4: Newark; Supplier 5: Digi-Key; Supplier 6: Newark; Supplier 7: Newark; Supplier Part Number 1: 68T3472; Supplier Part Number 2: 68T3472; Supplier Part Number 3: ATTINY5-TSHRCT-ND; Supplier Part Number 4: 41AH8368; Supplier Part Number 5: ATTINY4-TSHRCT-ND; Supplier Part Number 6: 68T3473; Supplier Part Number 7: 68T3473; Case/Package: SOT-23-6; Mount: SMT; Value: ATtiny10
footprint SOT23-6P95_280X145L45X40N (Small Outline Transistor (SOT23), 0.95 mm pitch; 6 pin, 2.90 mm L X 1.60 mm W X 1.45 mm H body)
pins: 1 PB0 (io), 2 GND (power), 3 PB1 (io), 4 PB2 (io), 5 VCC (power), 6 RES (in)
text: MCU

## BAT54S-E3-08
designator D?  (value not drawn)
Small Signal Schottky Diodes Dual serial; Max Repetitive Reverse Voltage (Vrrm): 30V; Reverse Recovery Time: 5ns; Peak Non-Repetitive Surge Current: 600mA; Forward Voltage: 800mV; Forward Current: 200mA; Max Reverse Current: 2uA; Power Dissipation: 230mW; Element Configuration: Single; Type: Микросхема; Value: BAT54S; Supplier 1: Allied Electronics; Supplier Part Number 1: 70061668; Supplier 2: RSComponents; Manufacturer 2: Vishay; Manufacturer Part Number 2: BAT54S-E3-08; RoHS: Yes; Category: Rectifier Diodes; Stock 2: 1100; Pricing 2: 100=0,16800, 1000=0,09200, 2000=0,08800, 4000=0,08300, 20000=0,07400, 100=0,12000, 1000=0,06600, 2000=0,06300, 4000=0,05900, 20000=0,05300 (USD); Mount: SMT; Case/Package: SOT-23-3; Number of Pins: 3; Weight: 0.00031oz; Min Operating Temperature: -55°C; Max Operating Temperature: 125°C; Packaging: Tape and Reel; Package Quantity: 3000; Recovery Time: 5ns; Max Forward Surge Current (Ifsm): 600mA; Average Rectified Current: 200mA; Max Reverse Voltage (DC): 30V; Length: 3.1mm; Width: 1.43mm; Height: 1.05mm; Radiation Hardening: No; REACH SVHC: Unknown; RoHS Compliant: Yes; ComponentLink1URL: https://datasheet.ciiva.com/28375/bat54v-28375589.pdf?src-supplier=Avnet+Europe; ComponentLink1Description: https://datasheet.ciiva.com/28375/bat54v-28375589.pdf?src-supplier=Avnet+Europe; ComponentLink2URL: https://datasheet.ciiva.com/46382/1913456-46382262.pdf?src-supplier=Element14; ComponentLink2Description: https://datasheet.ciiva.com/46382/1913456-46382262.pdf?src-supplier=Element14; ComponentLink3URL: https://datasheet.ciiva.com/46382/1913456-46382263.pdf?src-supplier=Element14; ComponentLink3Description: https://datasheet.ciiva.com/46382/1913456-46382263.pdf?src-supplier=Element14; ComponentLink4URL: https://datasheet.ciiva.com/29593/bat54v-29593996.pdf?src-supplier=Digi-Key; ComponentLink4Description: https://datasheet.ciiva.com/29593/bat54v-29593996.pdf?src-supplier=Digi-Key; ComponentLink5URL: https://datasheet.ciiva.com/29593/bat54v-29593997.pdf?src-supplier=Digi-Key; ComponentLink5Description: https://datasheet.ciiva.com/29593/bat54v-29593997.pdf?src-supplier=Digi-Key; ComponentLink6URL: https://datasheet.ciiva.com/29593/bat54v-29593998.pdf?src-supplier=Digi-Key; ComponentLink6Description: https://datasheet.ciiva.com/29593/bat54v-29593998.pdf?src-supplier=Digi-Key; Supplier Part Number 2: 8151229
footprint SOT23-3P95_240X110L25X60N (Small Outline Transistor (SOT23), 0.95 mm pitch; 3 pin, 2.90 mm L X 1.30 mm W X 1.10 mm H body)
footprint SOT23-3P95_240X110L30X43N (Small Outline Transistor (SOT23), 0.95 mm pitch; 3 pin, 2.90 mm L X 1.30 mm W X 1.10 mm H body)
pins: 1 A, 2 C, 3 A/C
text: *V

## BAV99.215
designator D?  (value not drawn)
High-speed switching diodes, encapsulated in small Surface-Mounted Device (SMD) plastic packages.; Type: Микросхема; Value: BAV99; Supplier 1: RSComponents; Supplier Part Number 1: 5444534; Case/Package: SOT-23-3; Mount: SMT
footprint SOT23-3P95_240X110L25X60N (Small Outline Transistor (SOT23), 0.95 mm pitch; 3 pin, 2.90 mm L X 1.30 mm W X 1.10 mm H body)
footprint SOT23-3P95_240X110L30X43N (Small Outline Transistor (SOT23), 0.95 mm pitch; 3 pin, 2.90 mm L X 1.30 mm W X 1.10 mm H body)
pins: 1 A, 2 C, 3 A/C
1 alternate drawing of the same symbol